# Altium footprint library 100K_0805_Yageo RC0805FR-07100KL.PcbLib: 1 footprints
Each footprint in its own frame and in the unit in brackets; x right, y up, seen from the top. Pads: shape width x height; smd on the part's side, far side on the other; paste and mask are expansions set on the pad; w line width, h text height; cw(c..) or ccw(c..) is an arc to the next point about the centre after c.
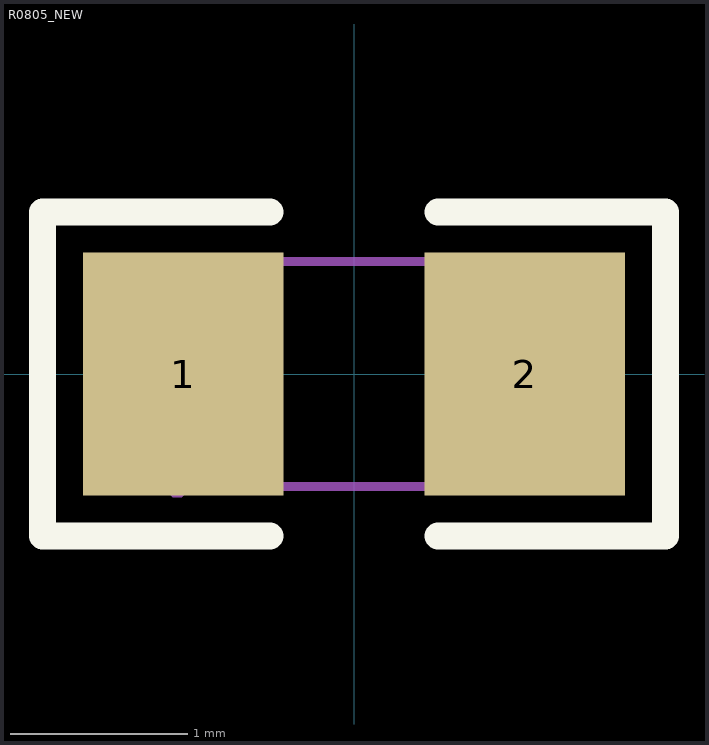
[diagram p0: the footprint, top view; thin cyan lines are the x and y axes]

## R0805_NEW [mm]
pads (2):
  rect 1.133x1.377 smd paste-100 mask+0.051: 1(-0.966,0) 2(0.966,0)
Top Overlay:
  lines w0.152: -0.476,-0.917 -1.761,-0.917 -1.761,0.917 -0.476,0.917 ; 0.476,-0.917 1.761,-0.917 1.761,0.917 0.476,0.917
Top Paste:
  region: 0.5,-0.64 0.5,-0.2 0.9,-0.2 0.9,0.2 0.5,0.2 0.5,0.64 0.55,0.69 1.75,0.69 1.8,0.64 1.8,-0.64 1.75,-0.69 0.55,-0.69
  region: -1.8,-0.64 -1.8,0.64 -1.75,0.69 -0.55,0.69 -0.5,0.64 -0.5,0.2 -0.9,0.2 -0.9,-0.2 -0.5,-0.2 -0.5,-0.64 -0.55,-0.69 -1.75,-0.69
Mechanical 6:
  lines w0.051: -1,-0.637 1,-0.637 1,0.637 -1,0.637 -1,-0.637
Mechanical 8:
  region: -0.94,-0.638 -0.94,-0.662 -0.975,-0.698 -1.025,-0.698 -1.06,-0.662 -1.06,-0.638 -1.06,-0.613 -1.025,-0.578 -0.975,-0.578 -0.94,-0.613 -0.94,-0.638
Mechanical 9:
  region: -1,-0.637 -1,0.637 -0.6,0.637 -0.6,-0.637
  region: 1,-0.637 1,0.637 0.6,0.637 0.6,-0.637